# EAGLE library part SYN-MODULE-WIFI (library pipeline_module_dup)
SYN-MODULE-WIFI Synthetic wireless module with split ground pad Source: JLCEDA/EasyEDA Official Library (https://lceda.cn/ , https://easyeda.com). Copyright of the library data belongs to JLCEDA/EasyEDA.
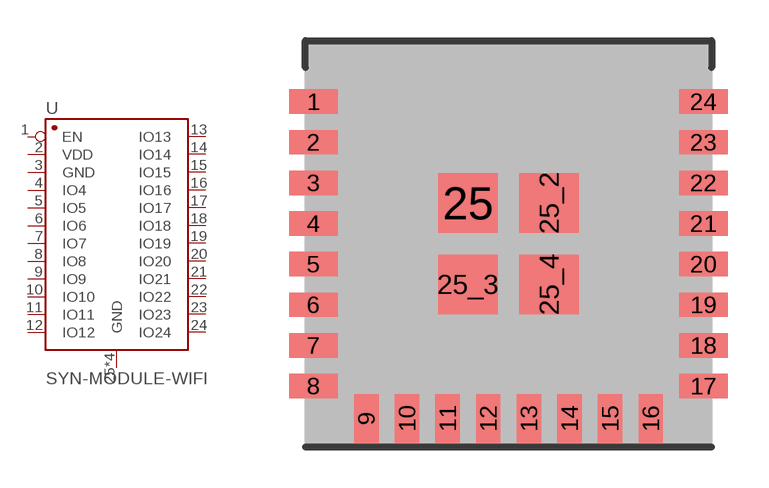
[diagram p0: symbol with the pads of SYN-MODULE-SMD-15X15; footprint SYN-MODULE-SMD-15X15]

Designator prefix U

## SYN-MODULE-WIFI (JLCPCB_CLASS: Extended Part; LCSC_PACKAGE: SYN-MODULE-SMD-15X15; LCSC_PART: C9000010; MANUFACTURER: SYN-Maker; MPN: SYN-MODULE-WIFI; SOURCE: Source: JLCEDA/EasyEDA Official Library (https://lceda.cn/ , https://easyeda.com). Copyright of the library data belongs to JLCEDA/EasyEDA.)  [SYN-MODULE-SMD-15X15]
1  EN  in
2  VDD  pwr
3  GND  pwr
4  IO4
5  IO5
6  IO6
7  IO7
8  IO8
9  IO9
10  IO10
11  IO11
12  IO12
13  IO13
14  IO14
15  IO15
16  IO16
17  IO17
18  IO18
19  IO19
20  IO20
21  IO21
22  IO22
23  IO23
24  IO24
25  GND  pwr
25_2  GND  pwr
25_3  GND  pwr
25_4  GND  pwr

## Footprint SYN-MODULE-SMD-15X15 (pad centres in mm)
SYN-MODULE-SMD-15X15
smd 1.8 x 0.9: 1 -7.2,5.25; 2 -7.2,3.75; 3 -7.2,2.25; 4 -7.2,0.75; 5 -7.2,-0.75; 6 -7.2,-2.25; 7 -7.2,-3.75; 8 -7.2,-5.25; 17 7.2,-5.25; 18 7.2,-3.75; 19 7.2,-2.25; 20 7.2,-0.75; 21 7.2,0.75; 22 7.2,2.25; 23 7.2,3.75; 24 7.2,5.25
smd 0.9 x 1.8: 9 -5.25,-6.45; 10 -3.75,-6.45; 11 -2.25,-6.45; 12 -0.75,-6.45; 13 0.75,-6.45; 14 2.25,-6.45; 15 3.75,-6.45; 16 5.25,-6.45
smd 2.2 x 2.2: 25 -1.5,1.5; 25_2 1.5,1.5; 25_3 -1.5,-1.5; 25_4 1.5,-1.5